# Altium schematic symbol library TS7224FK.SchLib: 1 symbol
Pins are listed as number, name and electrical type; pins without a type are passive.

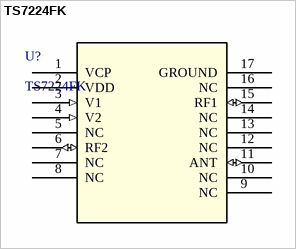
[diagram p0: symbol TS7224FK]

## TS7224FK
designator U?
Description; Manufacturer_Name: TagoreTech; Copyright: Copyright (C) 2025 Ultra Librarian. All rights reserved.; Manufacturer_Part_Number: TS7224FK; RefDes: RefDes; Type: Type
footprint QFN16_3x3x0p8_TGT
pins: 1 VCP, 2 VDD (power), 3 V1 (in), 4 V2 (in), 5 NC, 6 RF2 (io), 7 NC, 8 NC, 9 NC, 10 NC, 11 ANT (io), 12 NC, 13 NC, 14 NC, 15 RF1 (io), 16 NC, 17 GROUND (power)